# Altium footprint library Con2mmPCB.PcbLib: 2 footprints
Each footprint in its own frame and in the unit in brackets; x right, y up, seen from the top. Pads: shape width x height; smd on the part's side, far side on the other; paste and mask are expansions set on the pad; w line width, h text height; cw(c..) or ccw(c..) is an arc to the next point about the centre after c.
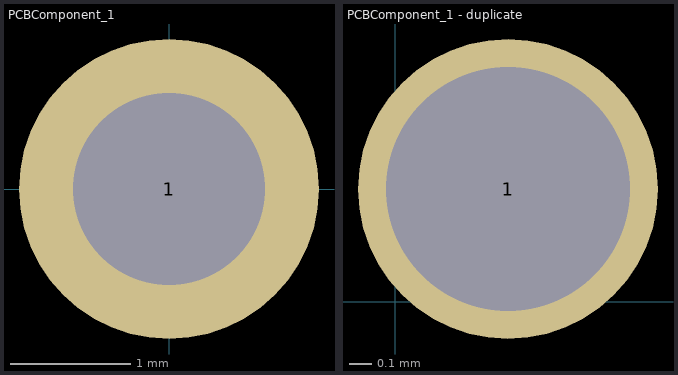
[diagram p0: the footprints below, top view; thin cyan lines are the x and y axes]

## PCBComponent_1 [mm]
pads (1):
  round 2.5 hole 1.6: 1(0,0)

## PCBComponent_1 - duplicate [mm]
pads (1):
  round 1.35 hole 1.1: 1(0.508,0.508)